# Altium schematic symbol library 100uF SMD Eletrolyte.SchLib: 1 symbol
Pins are listed as number, name and electrical type; pins without a type are passive.

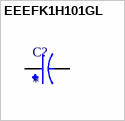
[diagram p0: symbol EEEFK1H101GL]

## EEEFK1H101GL
designator C?
100ÂµF 50V Aluminum Electrolytic Capacitors Radial, Can - SMD 2000 Hrs @ 105Â°C; MF: Panasonic; MP: EEEFK1H101GL; SnapEDA_Link: https://www.snapeda.com/parts/EEEFK1H101GL/Panasonic/view-part/?ref=snap; Package: RADIAL-2 Panasonic; Value: *; Check_prices: https://www.snapeda.com/parts/EEEFK1H101GL/Panasonic/view-part/?ref=eda
footprint CAP_EEEFK1H101GL
pins: 1, 2